# Altium footprint library Connector-Audio.PcbLib: 29 footprints (part 1 of 2)
Each footprint in its own frame and in the unit in brackets; x right, y up, seen from the top. Pads: shape width x height; smd on the part's side, far side on the other; paste and mask are expansions set on the pad; w line width, h text height; cw(c..) or ccw(c..) is an arc to the next point about the centre after c.
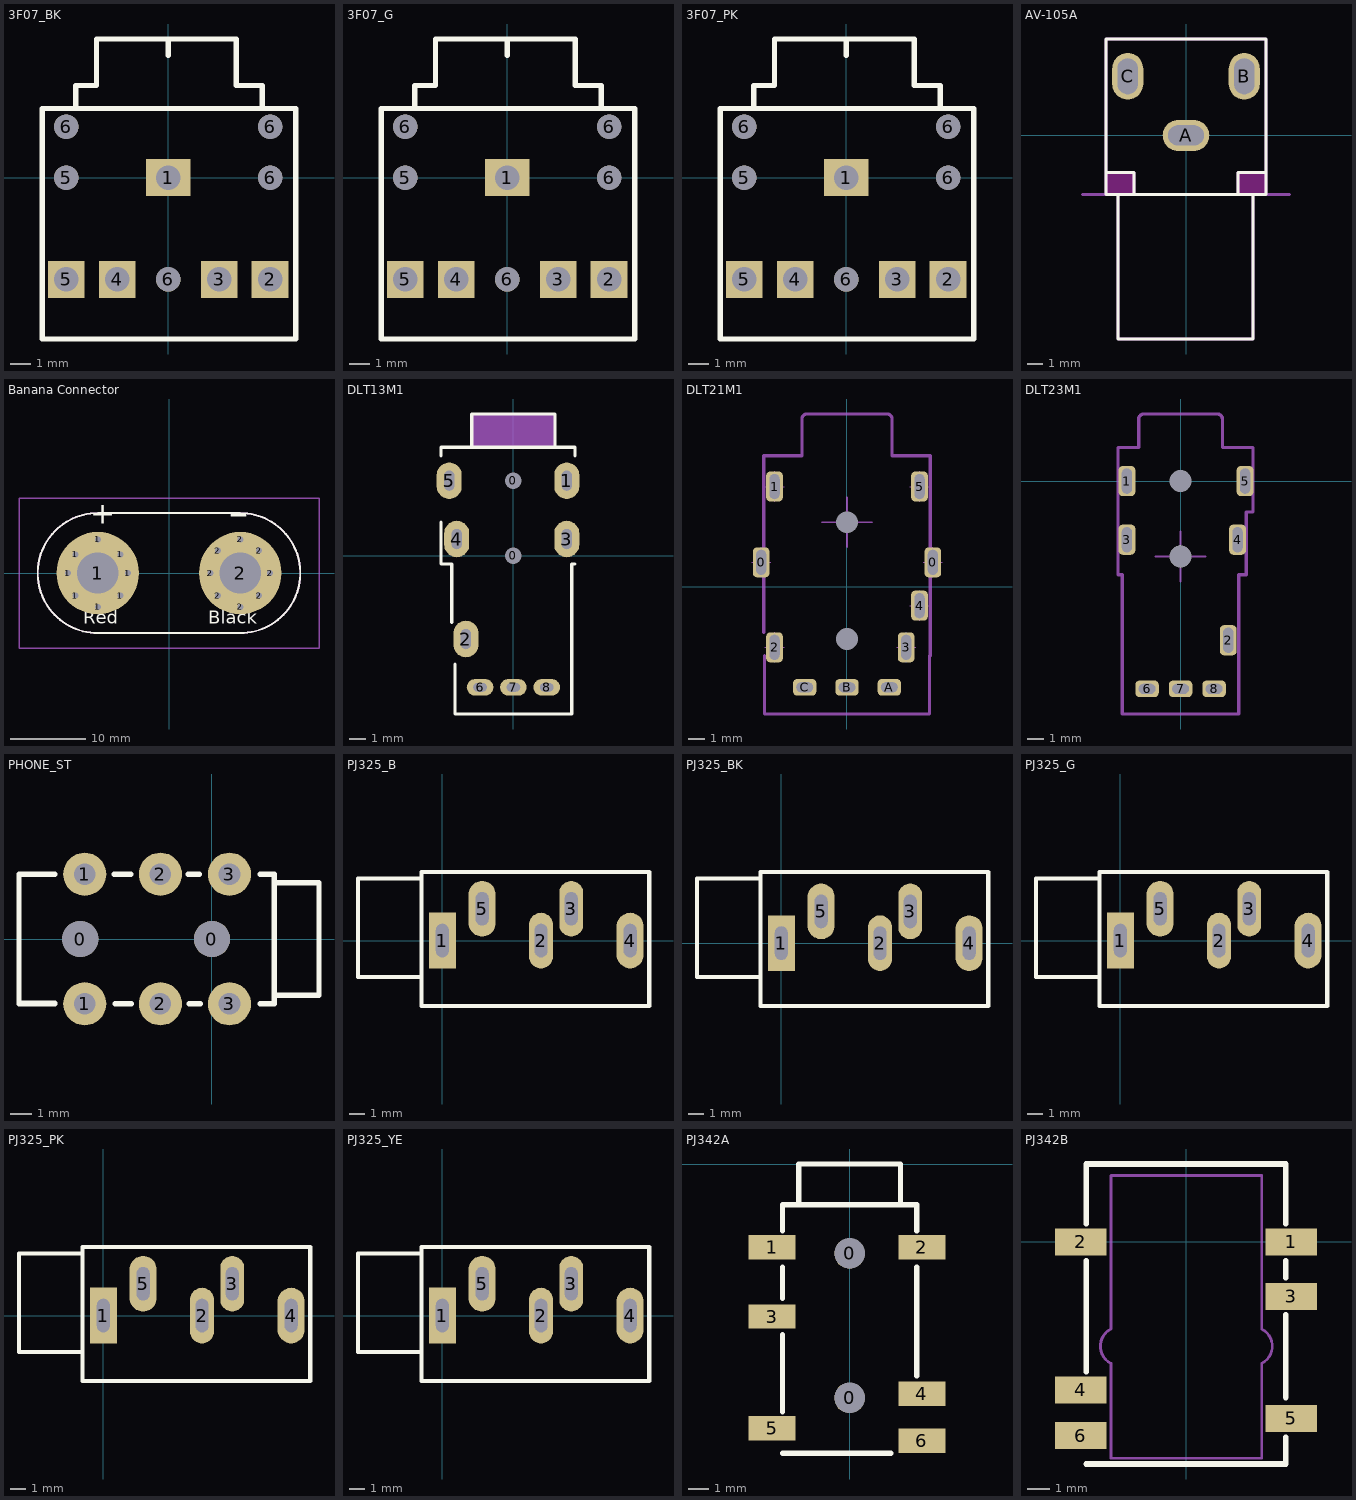
[diagram p0: the footprints below, top view; thin cyan lines are the x and y axes]

## 3F07_BK [mm] "黑色，14.2*12*5mm"
pads (10):
  rect 2.2x1.8 hole 1.2: 1(0,0)
  rect 1.8x1.8 hole 1.2: 2(5,-5) 3(2.5,-5) 4(-2.5,-5) 5(-5,-5)
  round 1.2 hole 1.2 unplated: 5(-5,0) 6(-5,2.5) 6(0,-5) 6(5,0) 6(5,2.5)
Top Overlay:
  lines w0.254: -4.532,3.382 -4.532,4.525 -3.516,4.525 -3.516,6.8 3.342,6.8 3.342,4.525 4.612,4.525 4.612,3.382 ; 0,6 0,6.8 ; -6.183,-7.921 -6.183,3.382 6.263,3.382 6.263,-7.921 -6.183,-7.921
3D body "3F07_BK-.STEP": height 5.6, standoff -2.9, extent -5.969,-7.735 6.031,6.465

## 3F07_G [mm] "绿色，14.2*12*5mm"
pads (10):
  rect 2.2x1.8 hole 1.2: 1(0,0)
  rect 1.8x1.8 hole 1.2: 2(5,-5) 3(2.5,-5) 4(-2.5,-5) 5(-5,-5)
  round 1.2 hole 1.2 unplated: 5(-5,0) 6(-5,2.5) 6(0,-5) 6(5,0) 6(5,2.5)
Top Overlay:
  lines w0.254: -4.532,3.382 -4.532,4.525 -3.516,4.525 -3.516,6.8 3.342,6.8 3.342,4.525 4.612,4.525 4.612,3.382 ; 0,6 0,6.8 ; -6.183,-7.921 -6.183,3.382 6.263,3.382 6.263,-7.921 -6.183,-7.921
3D body "3F07_G-.STEP": height 5.6, standoff -2.9, extent -5.969,-7.735 6.031,6.465

## 3F07_PK [mm] "粉色，14.2*12*5mm"
pads (10):
  rect 2.2x1.8 hole 1.2: 1(0,0)
  rect 1.8x1.8 hole 1.2: 2(5,-5) 3(2.5,-5) 4(-2.5,-5) 5(-5,-5)
  round 1.2 hole 1.2 unplated: 5(-5,0) 6(-5,2.5) 6(0,-5) 6(5,0) 6(5,2.5)
Top Overlay:
  lines w0.254: -4.532,3.382 -4.532,4.525 -3.516,4.525 -3.516,6.8 3.342,6.8 3.342,4.525 4.612,4.525 4.612,3.382 ; 0,6 0,6.8 ; -6.183,-7.921 6.263,-7.921 6.263,3.382 -6.183,3.382 -6.183,-7.921
3D body "3F07_PK-.STEP": height 5.6, standoff -2.9, extent -6.031,-7.608 5.969,6.592

## AV-105A [mm] "CAX(创都) AV-105A"
pads (3):
  oval 3x2 hole 1.3 slot 2.3 at 0 deg: A(0,0)
  oval 2x3 hole 1.3 slot 2.3 at 90 deg: B(3.75,3.8) C(-3.75,3.8)
Top Overlay:
  lines w0.2: -5.15,-2.4 -3.35,-2.4 -3.35,-3.8 ; -4.373,-3.8 -4.373,-13.1 4.3,-13.1 4.3,-3.8 ; 3.35,-3.8 3.35,-2.4 5.15,-2.4 ; -5.15,-3.8 5.15,-3.8 5.15,6.2 -5.15,6.2 -5.15,-3.8
Keep-Out Layer:
  board cut-out: -5.15,-2.4 -5.15,-3.8 -3.35,-3.8 -3.35,-2.4
  board cut-out: 3.35,-2.4 5.15,-2.4 5.15,-3.8 3.35,-3.8
Board Outline:
  lines w0.2: -6.65,-3.8 -5.15,-3.8 -5.15,-2.4 -3.35,-2.4 -3.35,-3.8 3.35,-3.8 3.35,-2.4 5.15,-2.4 5.15,-3.8 6.65,-3.8
Top Value:
  text "'.Comment'" at -3.301,1.444 h1.52
Top Designator:
  text "'.Designator'" at -4.373,1.306 h1.52
Top Assembly (Mech20):
  rectangle: -1,-0.5 1,0.5
  rectangle: -4.308,2.808 -3.285,4.808
  rectangle: 3.288,2.833 4.238,4.833
  lines w0.2: -5.15,-2.4 -3.35,-2.4 -3.35,-3.8 ; -4.373,-3.8 -4.373,-13.1 4.3,-13.1 4.3,-3.8 ; 3.35,-3.8 3.35,-2.4 5.15,-2.4 ; -5.15,-3.8 5.15,-3.8 5.15,6.2 -5.15,6.2 -5.15,-3.8
3D body "AV-105A.step": height 11.52, standoff -3.48, extent -5,-13.1 5.01,6.2

## Banana Connector [mm]
pads (18):
  round 1.524 hole 0.8: 1(-13.5,0) 1(-12.5,-3) 1(-12.5,2.5) 1(-9.5,-4.5) 1(-9.5,4.5) 1(-6.5,-3) 1(-6.5,2.5) 1(-5.5,0) 2(5.5,0) 2(6.5,-3) 2(6.5,3) 2(9.5,-4.5) 2(9.5,4.5) 2(12,-3) 2(12,3) 2(13.5,0)
  round 11 hole 5.5: 1(-9.5,0) 2(9.5,0)
Top Overlay:
  lines w0.254: -9.5,8 9.5,8.001 cw(c9.5,0) 9.499,-8.001 -9.5,-8.001 cw(c-9.499,0) -9.499,8.001
  text "Red" at -11.403,-7.373 h3
  text "Black" at 5.218,-7.373 h3
  text "+" at -10.498,5.566 h5
  text "_" at 8.326,7.427 h5
Bottom Overlay:
  lines w0.254: -9.5,8 9.5,8.001 cw(c9.5,0) 9.499,-8.001 -9.5,-8.001 cw(c-9.499,0) -9.499,8.001
Top Component Outline:
  lines w0.254: -9.5,-8.001 cw(c-9.499,0) -9.499,8.001 9.5,8.001 cw(c9.5,0) 9.499,-8.001 -9.5,-8.001
Top Value:
  text "'.Comment'" at -8.637,-1.163 h4
Top Designator:
  text "='.Designator'" at -12.654,-0.838 h4
Top Courtyard:
  lines w0.2: -20,-10 20,-10 20,10 -20,10 -20,-10
3D body "功放链接座子-香蕉座.sldprt": height 29.06, standoff -23.37, extent -18.007,-8.4 17.807,8.364

## DLT13M1 [mm]
pads (10):
  round 0.9 hole 1 unplated: 0(0,0) 0(0,4.5)
  oval 1.5x2.2 hole 0.6 slot 1.2 at 90 deg mask+0.051: 1(3.2,4.5) 2(-2.85,-5) 3(3.2,1) 4(-3.4,1) 5(-3.85,4.5)
  oval 1.6x1 hole 0.5 slot 0.8 at 0 deg mask+0.051: 6(-2,-7.9) 7(0,-7.9) 8(2,-7.9)
Top Overlay:
  lines w0.2: -4.35,2 -4.35,-0.5 -3.7,-0.5 -3.7,-4 ; -4.35,6 -4.35,6.5 3.7,6.5 3.7,6 ; -3.5,-6.5 -3.5,-9.5 3.5,-9.5 3.5,-0.5 3.7,-0.5 ; -2.5,6.5 -2.5,8.5 2.5,8.5 2.5,6.5
Top 3D Body:
  rectangle: -2.5,6.5 2.5,8.463
Top Value:
  text "'.Comment'" at 0.456,-3.301 h1.52
Top Designator:
  text "'.Designator'" at 0.594,-4.373 h1.52
3D body "DLT13M1.step": height 4.77, standoff -2.2, extent -4.305,-9.375 3.755,8.525

## DLT21M1 [mm] "3.5 TosLink connector"
pads (12):
  rrect50% 1x1.8 hole 1.5 slot 0.6 at 0 deg unplated: 0(-5.15,1.475) 0(5.15,1.475) 1(-4.35,6.025) 2(-4.35,-3.625) 3(3.55,-3.625) 4(4.35,-1.125) 5(4.35,6.025)
  rrect50% 1.4x1 hole 1 slot 0.6 at 90 deg unplated: A(2.54,-6.025) B(0,-6.025) C(-2.54,-6.025)
  round 0 hole 1.3 unplated: ""(0,-3.125) ""(0,3.875)
Board Outline:
  lines w0.013: -5.728,1.475 -4.572,1.475 ; -5.15,0.57 -5.15,2.38 ; -4.928,-3.625 -3.772,-3.625 ; -4.928,6.025 -3.772,6.025 ; -4.35,-4.53 -4.35,-2.72 ; -4.35,5.12 -4.35,6.93 ; -3.034,-6.025 -2.046,-6.025 ; -2.54,-6.356 -2.54,-5.694 ; -0.494,-6.025 0.494,-6.025 ; 0,-6.356 0,-5.694 ; 2.046,-6.025 3.034,-6.025 ; 2.54,-6.356 2.54,-5.694 ; 2.972,-3.625 4.128,-3.625 ; 3.55,-4.53 3.55,-2.72 ; 3.772,-1.125 4.928,-1.125 ; 3.772,6.025 4.928,6.025 ; 4.35,-2.03 4.35,-0.22 ; 4.35,5.12 4.35,6.93 ; 4.572,1.475 5.728,1.475 ; 5.15,0.57 5.15,2.38
Top Component Outline:
  lines w0.2: -5,-2.725 -5,7.875 -2.7,7.875 -2.7,10.075 cw(c-2.4,10.075) -2.4,10.375 0,10.375 2.4,10.375 cw(c2.4,10.075) 2.7,10.075 2.7,7.875 5,7.875 5,-4.125 4.95,-4.125 4.95,-7.625 -4.95,-7.625 -4.95,-4.125
Top Component Center:
  lines w0.1: -1.5,3.875 1.5,3.875 ; 0,2.375 0,5.375
Top Value:
  text "'.Comment'" at -3.301,1.924 h1.52
Top Designator:
  text "'.Designator'" at -4.373,1.785 h1.52
Top Assembly (Mech20):

## DLT23M1 [mm] "3.5 TosLink connector"
pads (10):
  rrect50% 1x1.8 hole 1.5 slot 0.6 at 0 deg unplated: 1(-3.2,0) 2(2.85,-9.5) 3(-3.2,-3.5) 4(3.4,-3.5) 5(3.85,0)
  rrect50% 1.4x1 hole 1 slot 0.6 at 90 deg unplated: 6(-2,-12.4) 7(0,-12.4) 8(2,-12.4)
  round 0 hole 1.3 unplated: ""(0,-4.5) ""(0,0)
Top Overlay:
  circle w0.013: c0,0 r0.6
  circle w0.013: c0,-4.5 r0.6
  lines w0.013: -3.6,-4.25 -2.8,-4.25 -2.8,-2.75 -3.6,-2.75 -3.6,-4.25 ; -3.6,-0.75 -2.8,-0.75 -2.8,0.75 -3.6,0.75 -3.6,-0.75 ; -2.4,-12.65 -1.6,-12.65 -1.6,-12.15 -2.4,-12.15 -2.4,-12.65 ; -0.4,-12.65 0.4,-12.65 0.4,-12.15 -0.4,-12.15 -0.4,-12.65 ; 1.6,-12.65 2.4,-12.65 2.4,-12.15 1.6,-12.15 1.6,-12.65 ; 2.45,-10.25 3.25,-10.25 3.25,-8.75 2.45,-8.75 2.45,-10.25 ; 3,-4.25 3.8,-4.25 3.8,-2.75 3,-2.75 3,-4.25 ; 3.45,-0.75 4.25,-0.75 4.25,0.75 3.45,0.75 3.45,-0.75
Top Component Outline:
  lines w0.2: -3.73,-5.6 -3.475,-5.6 ; -3.73,-5.6 -3.73,2 ; -3.73,-5.6 -3.475,-5.6 ; -3.73,-5.6 -3.73,2 ; -3.73,2 -2.5,2 ; -3.73,2 -2.5,2 ; -3.475,-13.9 3.475,-13.9 ; -3.475,-13.9 -3.475,-5.6 ; -3.475,-13.9 3.475,-13.9 ; -3.475,-13.9 -3.475,-5.6 ; -2.5,2 -2.5,3.7 ; -2.5,2 -2.5,3.7 ; -2.5,3.7 cw(c-2.2,3.7) -2.2,4 ; -2.5,3.7 cw(c-2.2,3.7) -2.2,4 ; -2.2,4 2.2,4 ; -2.2,4 2.2,4 ; 2.2,4 cw(c2.2,3.7) 2.5,3.7 ; 2.2,4 cw(c2.2,3.7) 2.5,3.7 ; 2.5,2 2.5,3.7 ; 2.5,2 4.32,2 ; 2.5,2 2.5,3.7 ; 2.5,2 4.32,2 ; 3.475,-13.9 3.475,-5.6 ; 3.475,-13.9 3.475,-5.6 ; 3.475,-5.6 3.92,-5.6 ; 3.475,-5.6 3.92,-5.6 ; 3.92,-5.6 3.92,-1.85 ; 3.92,-5.6 3.92,-1.85 ; 3.92,-1.85 4.32,-1.85 ; 3.92,-1.85 4.32,-1.85 ; 4.32,-1.85 4.32,2 ; 4.32,-1.85 4.32,2
Top Component Center:
  lines w0.1: -1.5,-4.5 1.5,-4.5 ; 0,-6 0,-3
Top Value:
  text "'.Comment'" at -3.301,-4.956 h1.52
Top Designator:
  text "'.Designator'" at -4.373,-5.094 h1.52

## PHONE_ST [mm]
pads (8):
  round 1.676 hole 1.676: 0(-6.096,0) 0(0,0)
  round 2 hole 1: 1(-5.89,-3) 1(-5.89,3) 2(-2.39,-3) 2(-2.39,3) 3(0.81,-3) 3(0.81,3)
Top Overlay:
  lines w0.254: -8.933,-2.969 -7.282,-2.969 ; -7.282,-3.007 -8.933,-3.007 -8.933,3 -7.282,3 ; -4.526,3 -3.764,3 ; -4.488,-3.007 -3.726,-3.007 ; -1.097,3 -0.589,3 ; -1.059,-3.007 -0.551,-3.007 ; 2.243,-3.007 2.79,-3.007 ; 2.243,3 2.878,3 2.878,-3.007 ; 2.878,-2.6 4.953,-2.6 4.953,2.6 2.878,2.6

## PJ325_B [mm] "蓝色，18*8.1*12.3mm"
pads (5):
  rect 1.7x3.5 hole 0.8 slot 2.1 at 90 deg: 1(0,0)
  oval 1.5x3.5 hole 0.8 slot 2.1 at 90 deg: 2(6.2,0) 3(8.1,2)
  oval 1.7x3.5 hole 0.8 slot 2.1 at 90 deg: 4(11.8,0) 5(2.5,2)
Top Overlay:
  lines w0.254: -1.3,-2.3 -5.3,-2.3 -5.3,3.9 -1.3,3.9 ; -1.3,-4.1 13,-4.1 13,4.3 -1.3,4.3 -1.3,-4.1
3D body "PJ325_B-.STEP": height 12.35, standoff -2.9, extent -5.203,-3.923 12.827,4.177

## PJ325_BK [mm] "黑色，18*8.1*12.3mm"
pads (5):
  rect 1.7x3.5 hole 0.8 slot 2.1 at 90 deg: 1(0,0)
  oval 1.5x3.5 hole 0.8 slot 2.1 at 90 deg: 2(6.2,0) 3(8.1,2)
  oval 1.7x3.5 hole 0.8 slot 2.1 at 90 deg: 4(11.8,0) 5(2.5,2)
Top Overlay:
  lines w0.254: -1.3,-2.136 -5.3,-2.136 -5.3,4.064 -1.3,4.064 ; -1.3,-3.936 13,-3.936 13,4.464 -1.3,4.464 -1.3,-3.936
3D body "PJ325_BK-.STEP": height 12.35, standoff -2.9, extent -5.203,-3.923 12.827,4.177

## PJ325_G [mm] "绿色，18*8.1*12.3mm"
pads (5):
  rect 1.7x3.5 hole 0.8 slot 2.1 at 90 deg: 1(0,0)
  oval 1.5x3.5 hole 0.8 slot 2.1 at 90 deg: 2(6.2,0) 3(8.1,2)
  oval 1.7x3.5 hole 0.8 slot 2.1 at 90 deg: 4(11.8,0) 5(2.5,2)
Top Overlay:
  lines w0.254: -1.3,-2.3 -5.3,-2.3 -5.3,3.9 -1.3,3.9 ; -1.3,-4.1 -1.3,4.3 13,4.3 13,-4.1 -1.3,-4.1
3D body "PJ325_G-.STEP": height 12.35, standoff -2.9, extent -5.205,-3.937 12.825,4.163

## PJ325_PK [mm] "粉色，18*8.1*12.3mm"
pads (5):
  rect 1.7x3.5 hole 0.8 slot 2.1 at 90 deg: 1(0,0)
  oval 1.5x3.5 hole 0.8 slot 2.1 at 90 deg: 2(6.2,0) 3(8.1,2)
  oval 1.7x3.5 hole 0.8 slot 2.1 at 90 deg: 4(11.8,0) 5(2.5,2)
Top Overlay:
  lines w0.254: -1.3,-2.3 -5.3,-2.3 -5.3,3.9 -1.3,3.9 ; -1.3,-4.1 -1.3,4.3 13,4.3 13,-4.1 -1.3,-4.1
3D body "PJ325_PK-.STEP": height 12.35, standoff -2.9, extent -5.205,-3.909 12.825,4.191

## PJ325_YE [mm] "黄色，18*8.1*12.3mm"
pads (5):
  rect 1.7x3.5 hole 0.8 slot 2.1 at 90 deg: 1(0,0)
  oval 1.5x3.5 hole 0.8 slot 2.1 at 90 deg: 2(6.2,0) 3(8.1,2)
  oval 1.7x3.5 hole 0.8 slot 2.1 at 90 deg: 4(11.8,0) 5(2.5,2)
Top Overlay:
  lines w0.254: -1.3,-2.3 -5.3,-2.3 -5.3,3.9 -1.3,3.9 ; -1.3,-4.1 -1.3,4.3 13,4.3 13,-4.1 -1.3,-4.1
3D body "PJ325_YE-.STEP": height 12.35, standoff -2.9, extent -5.205,-3.937 12.825,4.163

## PJ342A [mm] "有头"
pads (8):
  round 1.5 hole 1.5: 0(0,-11.5) 0(0,-4.4)
  rect 2.3x1.2 smd: 1(-3.81,-4.1) 2(3.556,-4.1) 3(-3.81,-7.5) 4(3.556,-11.3) 5(-3.81,-13) 6(3.556,-13.6)
Top Overlay:
  lines w0.254: -3.302,-14.224 2.032,-14.224 ; -3.302,-12.192 -3.302,-8.382 ; -3.302,-6.604 -3.302,-5.08 ; -3.302,-3.302 -3.302,-2 3.302,-2 3.302,-3.302 ; -2.5,-2 -2.5,0 2.5,0 2.5,-2 ; 3.302,-10.414 3.302,-5.08
3D body "PJ342A-.STEP": height 4.7, standoff -0.6, extent -4.191,-14.162 4.109,-0.062

## PJ342B [mm] "沉板式，无头"
pads (6):
  rect 2.3x1.2 smd: 1(4.699,0) 2(-4.699,0) 3(4.699,-2.43) 4(-4.699,-6.604) 5(4.699,-7.874) 6(-4.699,-8.636)
Top Overlay:
  lines w0.254: -4.445,-9.906 4.445,-9.906 4.445,-9.476 4.445,-8.714 ; -4.445,-5.793 -4.445,-0.84 ; -4.445,0.811 -4.445,3.478 4.445,3.478 4.445,0.811 ; 4.445,-6.936 4.445,-3.253 ; 4.445,-1.602 4.445,-0.84
Board Outline:
  lines w0.127: -3.353,-9.652 -3.353,-5.412 cw(c-2.972,-4.65) -3.353,-3.888 -3.353,2.97 3.378,2.97 3.378,-3.888 cw(c2.997,-4.65) 3.378,-5.412 3.378,-9.652 -3.353,-9.652
3D body "PJ342B-.STEP": height 1.25, standoff -2.75, extent -4.572,-9.285 4.928,3.697